# Altium schematic symbol library Schlib1.SchLib: 3 symbols
Pins are listed as number, name and electrical type; pins without a type are passive.

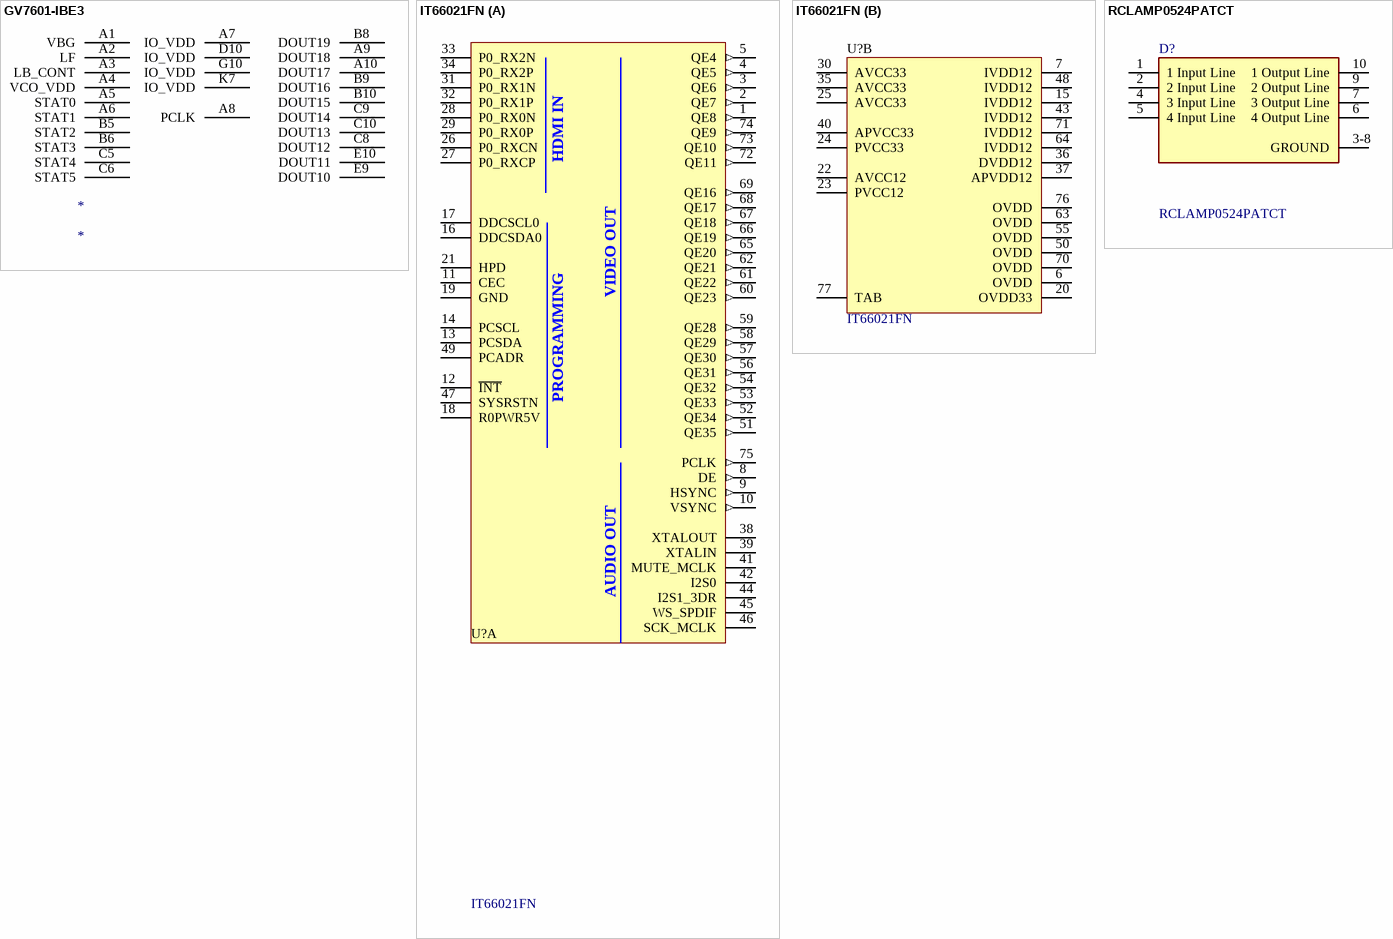
[diagram p0: symbols GV7601-IBE3 to RCLAMP0524PATCT]

## GV7601-IBE3
designator *
pins: A1 VBG, A2 LF, A3 LB_CONT, A4 VCO_VDD, A5 STAT0, A6 STAT1, A7 IO_VDD, A8 PCLK, A9 DOUT18, A10 DOUT17, B5 STAT2, B6 STAT3, B8 DOUT19, B9 DOUT16, B10 DOUT15, C5 STAT4, C6 STAT5, C8 DOUT12, C9 DOUT14, C10 DOUT13, D10 IO_VDD, E9 DOUT10, E10 DOUT11, G10 IO_VDD, K7 IO_VDD

## IT66021FN
designator U?
Single-port HDMI1.4 Receiver with 3D Support
footprint QFN40P900X900X90_HS-77N (QFN, 76-Leads, Body 9.00x9.00mm, Pitch 0.40mm, Thermal Pad 6.30x6.30mm, IPC Medium Density)
part A pins: 1 QE8 (out) "Digital Video Output Pins. Channel swap and MSB-LSB reversal are supported through register setting", 2 QE7 (out) "Digital Video Output Pins. Channel swap and MSB-LSB reversal are supported through register setting", 3 QE6 (out) "Digital Video Output Pins. Channel swap and MSB-LSB reversal are supported through register setting", 4 QE5 (out) "Digital Video Output Pins. Channel swap and MSB-LSB reversal are supported through register setting", 5 QE4 (out) "Digital Video Output Pins. Channel swap and MSB-LSB reversal are supported through register setting", 8 DE (out) "Data enable", 9 HSYNC (out) "Horizontal sync. signal", 10 VSYNC (out) "Vertical sync. signal", 11 CEC "CEC function I/O (5V-tolerant) pin", 12 ~{INT} "Interrupt output. Default active-low (5V-tolerant),", 13 PCSDA "Serial Programming Data for chip programming (5V-tolerant)", 14 PCSCL "Serial Programming Clock for chip programming (5V-tolerant)", 16 DDCSDA0 "DDC I2C Data for HDMI Port 0 (5V-tolerant)", 17 DDCSCL0 "DDC I2C Clock for HDMI Port 0 (5V-tolerant)", 18 R0PWR5V "TMDS transmitter detection for Port 0(5V-tolerant)", 19 GND "This pin must connect to Ground", 21 HPD "this pin is the HPD out signal", 26 P0_RXCN "HDMI Clock Channel negative input for HDMI Port 0", 27 P0_RXCP "HDMI Clock Channel positive input for HDMI Port 0", 28 P0_RX0N "HDMI Channel 0 negative input for HDMI Port 0", 29 P0_RX0P "HDMI Channel 0 positive input for HDMI Port 0", 31 P0_RX1N "HDMI Channel 1 negative input for HDMI Port 0", 32 P0_RX1P "HDMI Channel 1 positive input for HDMI Port 0", 33 P0_RX2N "HDMI Channel 2 negative input for HDMI Port 0", 34 P0_RX2P "HDMI Channel 2 positive input for HDMI Port 0", 38 XTALOUT "Crystal clock output (for Audio PLL)", 39 XTALIN "Crystal clock input (for Audio PLL)", 41 MUTE_MCLK "Audio master clock, doubles as Mute output", 42 I2S0 "I2S serial data output", 44 I2S1_3DR "I2S serial data output, doubles as doubles as 3D R/L signal", 45 WS_SPDIF "I2S word select output, doubles as S/PDIF audio output", 46 SCK_MCLK "I2S serial clock output, doubles as audio master clock output", 47 SYSRSTN "Hardware reset pin. Active LOW", 49 PCADR "Serial Programming device address select. Device address is 0x90 when PCADR is pulled low, 0x92 otherwise", 51 QE35 (out) "Digital Video Output Pins. Channel swap and MSB-LSB reversal are supported through register setting", 52 QE34 (out) "Digital Video Output Pins. Channel swap and MSB-LSB reversal are supported through register setting", 53 QE33 (out) "Digital Video Output Pins. Channel swap and MSB-LSB reversal are supported through register setting", 54 QE32 (out) "Digital Video Output Pins. Channel swap and MSB-LSB reversal are supported through register setting", 56 QE31 (out) "Digital Video Output Pins. Channel swap and MSB-LSB reversal are supported through register setting", 57 QE30 (out) "Digital Video Output Pins. Channel swap and MSB-LSB reversal are supported through register setting", 58 QE29 (out) "Digital Video Output Pins. Channel swap and MSB-LSB reversal are supported through register setting", 59 QE28 (out) "Digital Video Output Pins. Channel swap and MSB-LSB reversal are supported through register setting", 60 QE23 (out) "Digital Video Output Pins. Channel swap and MSB-LSB reversal are supported through register setting", 61 QE22 (out) "Digital Video Output Pins. Channel swap and MSB-LSB reversal are supported through register setting", 62 QE21 (out) "Digital Video Output Pins. Channel swap and MSB-LSB reversal are supported through register setting", 65 QE20 (out) "Digital Video Output Pins. Channel swap and MSB-LSB reversal are supported through register setting", 66 QE19 (out) "Digital Video Output Pins. Channel swap and MSB-LSB reversal are supported through register setting", 67 QE18 (out) "Digital Video Output Pins. Channel swap and MSB-LSB reversal are supported through register setting", 68 QE17 (out) "Digital Video Output Pins. Channel swap and MSB-LSB reversal are supported through register setting", 69 QE16 (out) "Digital Video Output Pins. Channel swap and MSB-LSB reversal are supported through register setting", 72 QE11 (out) "Digital Video Output Pins. Channel swap and MSB-LSB reversal are supported through register setting", 73 QE10 (out) "Digital Video Output Pins. Channel swap and MSB-LSB reversal are supported through register setting", 74 QE9 (out) "Digital Video Output Pins. Channel swap and MSB-LSB reversal are supported through register setting", 75 PCLK (out) "Output data clock. The backend controller should use the rising edge of PCLK to strobe QE Data"
part B pins: 6 OVDD "I/O Pin power (3.3V or 1.8V)", 7 IVDD12 "Digital logic power (1.2V)", 15 IVDD12 "Digital logic power (1.2V)", 20 OVDD33 "3/5V I/O Pin power (3.3V)", 22 AVCC12 "HDMI analog frontend power (1.2V)", 23 PVCC12 "HDMI receiver PLL power (1.2V)", 24 PVCC33 "HDMI PLL power (3.3V)", 25 AVCC33 "HDMI analog frontend power (3.3V)", 30 AVCC33 "HDMI analog frontend power (3.3V)", 35 AVCC33 "HDMI analog frontend power (3.3V)", 36 DVDD12 "HDMI AFE digital power (1.2V)", 37 APVDD12 "HDMI audio PLL power (1.2V)", 40 APVCC33 "HDMI PLL and analog frontend power (3.3V)", 43 IVDD12 "Digital logic power (1.2V)", 48 IVDD12 "Digital logic power (1.2V)", 50 OVDD "I/O Pin power (3.3V or 1.8V)", 55 OVDD "I/O Pin power (3.3V or 1.8V)", 63 OVDD "I/O Pin power (3.3V or 1.8V)", 64 IVDD12 "Digital logic power (1.2V)", 70 OVDD "I/O Pin power (3.3V or 1.8V)", 71 IVDD12 "Digital logic power (1.2V)", 76 OVDD "I/O Pin power (3.3V or 1.8V)", 77 TAB "Analog, Digital, I/O Ground Plane"
part A text: HDMI IN; VIDEO OUT; PROGRAMMING; AUDIO OUT

## RCLAMP0524PATCT
designator D?
TVS DIODE 5V 15V SLP2510P8; Number of Unidirectional Channels: 4; Min Breakdown Voltage: 6V; Direction: Unidirectional; Power Line Protection: Yes; Peak Pulse Power: 150W; Leakage Current: 1uA; Capacitance: 0.8pF; Peak Pulse Current: 1A; Series: RailClamp®; Min Operating Temperature: -55°C; Number of Bidirectional Channels: 4; Mount: Surface Mount; Clamping Voltage: 15V; Clamping Voltage-Max: 15V; Max Operating Temperature: 125°C; Working Voltage: 5V; Case/Package: SMD/SMT; Packaging: Tape and Reel; RoHS Compliant: Yes; Reverse Standoff Voltage: 5V; Radiation Hardening: No; Number of Pins: 10; Depth: 1mm; Length: 2.5mm
footprint FP-SLP2510P8-MFG
pins: 1 1 Input Line, 2 2 Input Line, 3-8 GROUND (power), 4 3 Input Line, 5 4 Input Line, 6 4 Output Line, 7 3 Output Line, 9 2 Output Line, 10 1 Output Line